# Altium footprint library Connectors.PcbLib: 51 footprints (part 3 of 4)
Each footprint in its own frame and in the unit in brackets; x right, y up, seen from the top. Pads: shape width x height; smd on the part's side, far side on the other; paste and mask are expansions set on the pad; w line width, h text height; cw(c..) or ccw(c..) is an arc to the next point about the centre after c.
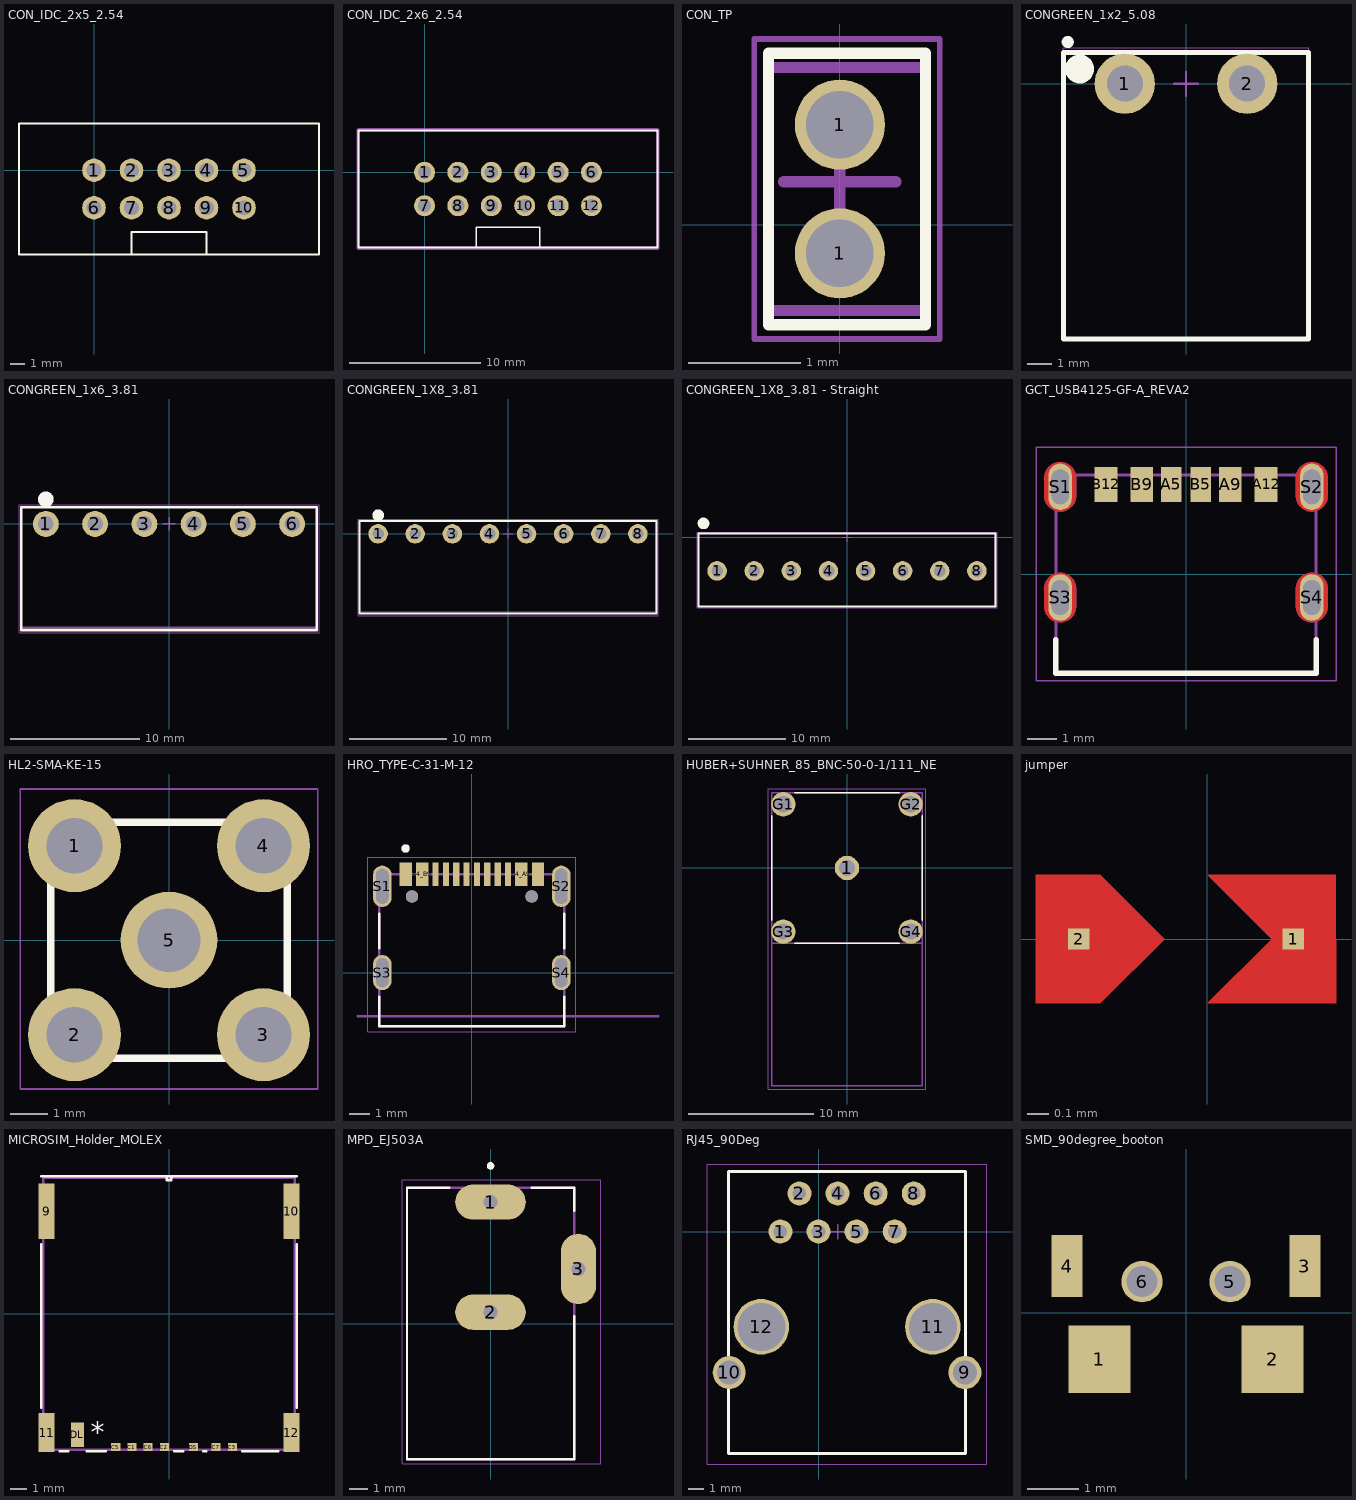
[diagram p2: the footprints below, top view; thin cyan lines are the x and y axes]

## CON_IDC_2x5_2.54 [mm]
pads (10):
  round 1.6 hole 1: 1(0,0) 2(2.54,0) 3(5.08,0) 4(7.62,0) 5(10.16,0) 6(0,-2.54) 7(2.54,-2.54) 8(5.08,-2.54) 9(7.62,-2.54) 10(10.16,-2.54)
Top Overlay:
  lines w0.127: -5.08,-5.715 -5.08,3.175 15.24,3.175 15.24,-5.715 -5.08,-5.715
  lines w0.128: 2.54,-5.715 2.54,-4.191 7.62,-4.191 7.62,-5.715
3D body: height 0.9, standoff 0.1, extent -5.08,-5.715 15.265,3.175

## CON_IDC_2x6_2.54 [mm]
pads (12):
  round 1.6 hole 1: 1(0,0) 2(2.54,0) 3(5.08,0) 4(7.62,0) 5(10.16,0) 6(12.7,0) 7(0,-2.54) 8(2.54,-2.54) 9(5.08,-2.54) 10(7.62,-2.54) 11(10.16,-2.54) 12(12.7,-2.54)
Top Overlay:
  lines w0.128: 3.937,-5.715 3.937,-4.191 8.763,-4.191 8.763,-5.715 ; -5.016,-5.715 17.717,-5.715 17.717,3.175 -5.016,3.175 -5.016,-5.715
Top Assembly:
  lines w0.254: -5.06,-5.77 17.76,-5.77 17.76,3.23 -5.06,3.23 -5.06,-5.77
3D body: height 0.9, standoff 0.1, extent -5.017,-5.715 17.717,3.175

## CON_TP [mm] "Test Point"
height 1.4
pads (2):
  round 0.8 hole 0.6: 1(0,-0.254) 1(0,0.889)
Top Overlay:
  lines w0.1: -0.635,-0.889 0.762,-0.889 0.762,1.524 -0.635,1.524 -0.635,-0.889
Mechanical 1:
  lines w0.1: -0.635,-0.762 -0.635,1.397 ; 0.762,-0.762 0.762,1.397
Mechanical 13:
  lines w0.1: -0.635,-0.762 0.762,-0.762 ; -0.635,1.397 0.762,1.397
Mechanical 15:
  lines w0.05: -0.762,-1.016 -0.762,1.651 0.889,1.651 0.889,-1.016 -0.762,-1.016
  lines w0.1: -0.5,0.381 0.5,0.381 ; 0,-0.119 0,0.881
3D body: height 6.3, standoff 0.1, extent -0.635,-0.762 0.762,1.397

## CONGREEN_1x2_5.08 [mm]
height 4.8
pads (2):
  round 2.5 hole 1.5: 1(-2.54,0) 2(2.54,0)
Top Overlay:
  circle w0.25: c-4.91,1.73 r0.125
  circle w0.6: c-4.42,0.61 r0.3
  lines w0.2: -5.08,-10.6 -5.08,1.3 5.08,1.3 5.08,-10.6 -5.08,-10.6
Mechanical 13:
  circle w0.1: c-4.43,0.61 r0.5
  lines w0.1: -5.08,-10.6 -5.08,1.3 5.08,1.3 5.08,-10.6 -5.08,-10.6
Mechanical 15:
  lines w0.05: -5.1,-10.6 -5.1,1.5 5.1,1.5 5.1,-10.6 -5.1,-10.6
  lines w0.1: -0.5,0 0.5,0 ; 0,-0.5 0,0.5
3D body: height 3.6, standoff -3.6, extent -3.04,-0.5 -2.04,0.5
3D body: height 3.6, standoff -3.6, extent 2.04,-0.5 3.04,0.5
3D body: height 4.6, standoff 3.6, extent 2.02,-9.5 3.02,0.55
3D body: height 4.6, standoff 3.6, extent -3.03,-9.5 -2.03,0.6
3D body: height 8.2, standoff 0.1, extent -5.08,-3.35 5.08,1.35
3D body: height 1.8, standoff 0.1, extent -5.08,-10.62 5.08,1.29
3D body: height 9, standoff 8.2, extent -5.09,-10.622 5.07,-7.9
3D body: height 8.2, standoff 6.5, extent -5.08,-10.62 5.08,1.29

## CONGREEN_1x6_3.81 [mm] "SOIC, 100-Leads, Body 64,17x3,05mm, Pitch 1,27mm, IPC Medium Density"
height 4.8
pads (6):
  round 2 hole 1.2: 1(-9.525,0) 2(-5.715,0) 3(-1.905,0) 4(1.905,0) 5(5.715,0) 6(9.525,0)
Top Overlay:
  circle w0.6: c-9.525,1.905 r0.3
  lines w0.2: -11.43,-8.2 -11.43,1.3 11.43,1.3 11.43,-8.2 -11.43,-8.2
Mechanical 13:
  lines w0.1: -11.43,-8 -11.43,1.3 11.43,1.3 11.43,-8 -11.43,-8
Mechanical 15:
  lines w0.05: -11.6,-8.4 -11.6,1.5 11.6,1.5 11.6,-8.4 -11.6,-8.4
  lines w0.1: -0.5,0 0.5,0 ; 0,-0.5 0,0.5
3D body: height 3.8, standoff 3, extent 9.08,-7.6 9.98,0.4
3D body: height 3.6, standoff -3.6, extent 9.075,-0.45 9.975,0.45
3D body: height 3.8, standoff 3, extent -9.97,-7.6 -9.07,0.4
3D body: height 3.6, standoff -3.6, extent -9.975,-0.45 -9.075,0.45
3D body: height 3.8, standoff 3, extent -6.16,-7.6 -5.26,0.4
3D body: height 3.6, standoff -3.6, extent -6.165,-0.45 -5.265,0.45
3D body: height 3.8, standoff 3, extent -2.35,-7.6 -1.45,0.4
3D body: height 3.6, standoff -3.6, extent -2.355,-0.45 -1.455,0.45
3D body: height 3.6, standoff -3.6, extent 1.455,-0.45 2.355,0.45
3D body: height 3.8, standoff 3, extent 1.46,-7.6 2.36,0.4
3D body: height 6.8, standoff 0.1, extent -11.43,-1.5 11.43,1.35
3D body: height 0.9, standoff 0.1, extent -11.43,-8 11.43,1.29
3D body: height 6.8, standoff 6, extent -11.43,-8 11.43,1.29
3D body: height 3.8, standoff 3, extent 5.27,-7.6 6.17,0.4
3D body: height 3.6, standoff -3.6, extent 5.265,-0.45 6.165,0.45

## CONGREEN_1X8_3.81 [mm] "SOIC, 100-Leads, Body 64,17x3,05mm, Pitch 1,27mm, IPC Medium Density"
height 4.8
pads (8):
  round 2 hole 1.2: 1(-13.335,0) 2(-9.525,0) 3(-5.715,0) 4(-1.905,0) 5(1.905,0) 6(5.715,0) 7(9.525,0) 8(13.335,0)
Top Overlay:
  circle w0.6: c-13.335,1.905 r0.3
  lines w0.2: -15.24,-8.2 -15.24,1.3 15.24,1.3 15.24,-8.2 -15.24,-8.2
Mechanical 13:
  lines w0.1: -15.24,-8 -15.24,1.3 15.24,1.3 15.24,-8 -15.24,-8
Mechanical 15:
  lines w0.05: -15.4,-8.4 -15.4,1.5 15.4,1.5 15.4,-8.4 -15.4,-8.4
  lines w0.1: -0.5,0 0.5,0 ; 0,-0.5 0,0.5
3D body: height 3.8, standoff 3, extent 12.89,-7.6 13.79,0.4
3D body: height 3.6, standoff -3.6, extent 12.885,-0.45 13.785,0.45
3D body: height 3.8, standoff 3, extent 9.08,-7.6 9.98,0.4
3D body: height 3.6, standoff -3.6, extent 9.075,-0.45 9.975,0.45
3D body: height 3.8, standoff 3, extent 5.27,-7.6 6.17,0.4
3D body: height 3.6, standoff -3.6, extent 5.265,-0.45 6.165,0.45
3D body: height 3.8, standoff 3, extent -13.78,-7.6 -12.88,0.4
3D body: height 3.6, standoff -3.6, extent -13.785,-0.45 -12.885,0.45
3D body: height 3.8, standoff 3, extent -9.97,-7.6 -9.07,0.4
3D body: height 3.6, standoff -3.6, extent -9.975,-0.45 -9.075,0.45
3D body: height 3.8, standoff 3, extent -6.16,-7.6 -5.26,0.4
3D body: height 3.6, standoff -3.6, extent -6.165,-0.45 -5.265,0.45
3D body: height 3.6, standoff -3.6, extent -2.355,-0.45 -1.455,0.45
3D body: height 3.8, standoff 3, extent -2.35,-7.6 -1.45,0.4
3D body: height 6.8, standoff 0.1, extent -15.24,-1.5 15.24,1.35
3D body: height 0.9, standoff 0.1, extent -15.24,-8 15.24,1.29
3D body: height 6.8, standoff 6, extent -15.24,-8 15.24,1.29
3D body: height 3.8, standoff 3, extent 1.46,-7.6 2.36,0.4
3D body: height 3.6, standoff -3.6, extent 1.455,-0.45 2.355,0.45

## CONGREEN_1X8_3.81 - Straight [mm] "Straight Pin 3.81MM Pitch green connector"
height 4.8
pads (8):
  round 2 hole 1.2: 1(-13.335,-3.48) 2(-9.525,-3.48) 3(-5.715,-3.48) 4(-1.905,-3.48) 5(1.905,-3.48) 6(5.715,-3.48) 7(9.525,-3.48) 8(13.335,-3.48)
Top Overlay:
  circle w0.6: c-14.732,1.397 r0.3
  lines w0.2: -15.24,-7.112 -15.24,0.381 15.24,0.381 15.24,-7.112 -15.24,-7.112
Mechanical 13:
  lines w0.1: -15.24,-7.112 -15.24,0.381 15.24,0.381 15.24,-7.112 -15.24,-7.112
Mechanical 15:
  lines w0.05: -15.4,-7.239 -15.4,0.508 15.4,0.508 15.4,-7.239 -15.4,-7.239
  lines w0.1: -0.5,0 0.5,0 ; 0,-0.5 0,0.5
3D body: height 6, standoff -1.2, extent -9.975,-3.93 -9.075,-3.03
3D body: height 6, standoff -1.2, extent 12.885,-3.93 13.785,-3.03
3D body: height 6, standoff -1.2, extent 9.075,-3.93 9.975,-3.03
3D body: height 6, standoff -1.2, extent 5.265,-3.93 6.165,-3.03
3D body: height 6, standoff -1.2, extent -13.785,-3.93 -12.885,-3.03
3D body: height 6, standoff -1.2, extent -6.165,-3.93 -5.265,-3.03
3D body: height 6, standoff -1.2, extent -2.355,-3.93 -1.455,-3.03
3D body: height 0.9, standoff 0.1, extent -15.24,-7.112 15.24,0.381
3D body: height 6, standoff -1.2, extent 1.455,-3.93 2.355,-3.03
3D body: height 8, standoff 0.1, extent -15.24,-0.381 15.24,0.381
3D body: height 8, standoff 0.1, extent -15.24,-7.112 15.24,-6.35

## GCT_USB4125-GF-A_REVA2 [mm]
pads (10):
  rect 0.7x1.2 smd: A5(-0.5,3.08) B5(0.5,3.08)
  rect 0.76x1.2 smd: A9(1.52,3.08) B9(-1.52,3.08)
  rect 0.8x1.2 smd: A12(2.75,3.08) B12(-2.75,3.08)
  oval 0.8x1.6 hole 0.6 slot 1.2 at 90 deg mask+0: S1(-4.32,3) S2(4.32,3) S3(-4.32,-0.8) S4(4.32,-0.8)
Top Layer:
  region: -4.291,0.049 -4.263,0.047 -4.234,0.043 -4.206,0.038 -4.178,0.031 -4.15,0.023 -4.123,0.013 -4.096,0.002 -4.07,-0.01 -4.045,-0.024 -4.02,-0.039 -3.997,-0.055 -3.974,-0.073 -3.952,-0.091 -3.931,-0.111 -3.911,-0.132 -3.893,-0.154 -3.875,-0.177 -3.859,-0.2 -3.844,-0.225 -3.83,-0.25 -3.818,-0.276 -3.807,-0.303 -3.797,-0.33 -3.789,-0.358 -3.782,-0.386 -3.777,-0.414 -3.773,-0.443 -3.771,-0.471 -3.77,-0.5 -3.77,-1.1 -3.771,-1.129 -3.773,-1.157 -3.777,-1.186 -3.782,-1.214 -3.789,-1.242 -3.797,-1.27 -3.807,-1.297 -3.818,-1.324 -3.83,-1.35 -3.844,-1.375 -3.859,-1.4 -3.875,-1.423 -3.893,-1.446 -3.911,-1.468 -3.931,-1.489 -3.952,-1.509 -3.974,-1.527 -3.997,-1.545 -4.02,-1.561 -4.045,-1.576 -4.07,-1.59 -4.096,-1.602 -4.123,-1.613 -4.15,-1.623 -4.178,-1.631 -4.206,-1.638 -4.234,-1.643 -4.263,-1.647 -4.291,-1.649 -4.32,-1.65 -4.349,-1.649 -4.377,-1.647 -4.406,-1.643 -4.434,-1.638 -4.462,-1.631 -4.49,-1.623 -4.517,-1.613 -4.544,-1.602 -4.57,-1.59 -4.595,-1.576 -4.62,-1.561 -4.643,-1.545 -4.666,-1.527 -4.688,-1.509 -4.709,-1.489 -4.729,-1.468 -4.747,-1.446 -4.765,-1.423 -4.781,-1.4 -4.796,-1.375 -4.81,-1.35 -4.822,-1.324 -4.833,-1.297 -4.843,-1.27 -4.851,-1.242 -4.858,-1.214 -4.863,-1.186 -4.867,-1.157 -4.869,-1.129 -4.87,-1.1 -4.87,-0.5 -4.869,-0.471 -4.867,-0.443 -4.863,-0.414 -4.858,-0.386 -4.851,-0.358 -4.843,-0.33 -4.833,-0.303 -4.822,-0.276 -4.81,-0.25 -4.796,-0.225 -4.781,-0.2 -4.765,-0.177 -4.747,-0.154 -4.729,-0.132 -4.709,-0.111 -4.688,-0.091 -4.666,-0.073 -4.643,-0.055 -4.62,-0.039 -4.595,-0.024 -4.57,-0.01 -4.544,0.002 -4.517,0.013 -4.49,0.023 -4.462,0.031 -4.434,0.038 -4.406,0.043 -4.377,0.047 -4.349,0.049 -4.32,0.05
  region: 4.349,0.049 4.377,0.047 4.406,0.043 4.434,0.038 4.462,0.031 4.49,0.023 4.517,0.013 4.544,0.002 4.57,-0.01 4.595,-0.024 4.62,-0.039 4.643,-0.055 4.666,-0.073 4.688,-0.091 4.709,-0.111 4.729,-0.132 4.747,-0.154 4.765,-0.177 4.781,-0.2 4.796,-0.225 4.81,-0.25 4.822,-0.276 4.833,-0.303 4.843,-0.33 4.851,-0.358 4.858,-0.386 4.863,-0.414 4.867,-0.443 4.869,-0.471 4.87,-0.5 4.87,-1.1 4.869,-1.129 4.867,-1.157 4.863,-1.186 4.858,-1.214 4.851,-1.242 4.843,-1.27 4.833,-1.297 4.822,-1.324 4.81,-1.35 4.796,-1.375 4.781,-1.4 4.765,-1.423 4.747,-1.446 4.729,-1.468 4.709,-1.489 4.688,-1.509 4.666,-1.527 4.643,-1.545 4.62,-1.561 4.595,-1.576 4.57,-1.59 4.544,-1.602 4.517,-1.613 4.49,-1.623 4.462,-1.631 4.434,-1.638 4.406,-1.643 4.377,-1.647 4.349,-1.649 4.32,-1.65 4.291,-1.649 4.263,-1.647 4.234,-1.643 4.206,-1.638 4.178,-1.631 4.15,-1.623 4.123,-1.613 4.096,-1.602 4.07,-1.59 4.045,-1.576 4.02,-1.561 3.997,-1.545 3.974,-1.527 3.952,-1.509 3.931,-1.489 3.911,-1.468 3.893,-1.446 3.875,-1.423 3.859,-1.4 3.844,-1.375 3.83,-1.35 3.818,-1.324 3.807,-1.297 3.797,-1.27 3.789,-1.242 3.782,-1.214 3.777,-1.186 3.773,-1.157 3.771,-1.129 3.77,-1.1 3.77,-0.5 3.771,-0.471 3.773,-0.443 3.777,-0.414 3.782,-0.386 3.789,-0.358 3.797,-0.33 3.807,-0.303 3.818,-0.276 3.83,-0.25 3.844,-0.225 3.859,-0.2 3.875,-0.177 3.893,-0.154 3.911,-0.132 3.931,-0.111 3.952,-0.091 3.974,-0.073 3.997,-0.055 4.02,-0.039 4.045,-0.024 4.07,-0.01 4.096,0.002 4.123,0.013 4.15,0.023 4.178,0.031 4.206,0.038 4.234,0.043 4.263,0.047 4.291,0.049 4.32,0.05
  region: -4.291,3.849 -4.263,3.847 -4.234,3.843 -4.206,3.838 -4.178,3.831 -4.15,3.823 -4.123,3.813 -4.096,3.802 -4.07,3.79 -4.045,3.776 -4.02,3.761 -3.997,3.745 -3.974,3.727 -3.952,3.709 -3.931,3.689 -3.911,3.668 -3.893,3.646 -3.875,3.623 -3.859,3.6 -3.844,3.575 -3.83,3.55 -3.818,3.524 -3.807,3.497 -3.797,3.47 -3.789,3.442 -3.782,3.414 -3.777,3.386 -3.773,3.357 -3.771,3.329 -3.77,3.3 -3.77,2.7 -3.771,2.671 -3.773,2.643 -3.777,2.614 -3.782,2.586 -3.789,2.558 -3.797,2.53 -3.807,2.503 -3.818,2.476 -3.83,2.45 -3.844,2.425 -3.859,2.4 -3.875,2.377 -3.893,2.354 -3.911,2.332 -3.931,2.311 -3.952,2.291 -3.974,2.273 -3.997,2.255 -4.02,2.239 -4.045,2.224 -4.07,2.21 -4.096,2.198 -4.123,2.187 -4.15,2.177 -4.178,2.169 -4.206,2.162 -4.234,2.157 -4.263,2.153 -4.291,2.151 -4.32,2.15 -4.349,2.151 -4.377,2.153 -4.406,2.157 -4.434,2.162 -4.462,2.169 -4.49,2.177 -4.517,2.187 -4.544,2.198 -4.57,2.21 -4.595,2.224 -4.62,2.239 -4.643,2.255 -4.666,2.273 -4.688,2.291 -4.709,2.311 -4.729,2.332 -4.747,2.354 -4.765,2.377 -4.781,2.4 -4.796,2.425 -4.81,2.45 -4.822,2.476 -4.833,2.503 -4.843,2.53 -4.851,2.558 -4.858,2.586 -4.863,2.614 -4.867,2.643 -4.869,2.671 -4.87,2.7 -4.87,3.3 -4.869,3.329 -4.867,3.357 -4.863,3.386 -4.858,3.414 -4.851,3.442 -4.843,3.47 -4.833,3.497 -4.822,3.524 -4.81,3.55 -4.796,3.575 -4.781,3.6 -4.765,3.623 -4.747,3.646 -4.729,3.668 -4.709,3.689 -4.688,3.709 -4.666,3.727 -4.643,3.745 -4.62,3.761 -4.595,3.776 -4.57,3.79 -4.544,3.802 -4.517,3.813 -4.49,3.823 -4.462,3.831 -4.434,3.838 -4.406,3.843 -4.377,3.847 -4.349,3.849 -4.32,3.85
  region: 4.349,3.849 4.377,3.847 4.406,3.843 4.434,3.838 4.462,3.831 4.49,3.823 4.517,3.813 4.544,3.802 4.57,3.79 4.595,3.776 4.62,3.761 4.643,3.745 4.666,3.727 4.688,3.709 4.709,3.689 4.729,3.668 4.747,3.646 4.765,3.623 4.781,3.6 4.796,3.575 4.81,3.55 4.822,3.524 4.833,3.497 4.843,3.47 4.851,3.442 4.858,3.414 4.863,3.386 4.867,3.357 4.869,3.329 4.87,3.3 4.87,2.7 4.869,2.671 4.867,2.643 4.863,2.614 4.858,2.586 4.851,2.558 4.843,2.53 4.833,2.503 4.822,2.476 4.81,2.45 4.796,2.425 4.781,2.4 4.765,2.377 4.747,2.354 4.729,2.332 4.709,2.311 4.688,2.291 4.666,2.273 4.643,2.255 4.62,2.239 4.595,2.224 4.57,2.21 4.544,2.198 4.517,2.187 4.49,2.177 4.462,2.169 4.434,2.162 4.406,2.157 4.377,2.153 4.349,2.151 4.32,2.15 4.291,2.151 4.263,2.153 4.234,2.157 4.206,2.162 4.178,2.169 4.15,2.177 4.123,2.187 4.096,2.198 4.07,2.21 4.045,2.224 4.02,2.239 3.997,2.255 3.974,2.273 3.952,2.291 3.931,2.311 3.911,2.332 3.893,2.354 3.875,2.377 3.859,2.4 3.844,2.425 3.83,2.45 3.818,2.476 3.807,2.503 3.797,2.53 3.789,2.558 3.782,2.586 3.777,2.614 3.773,2.643 3.771,2.671 3.77,2.7 3.77,3.3 3.771,3.329 3.773,3.357 3.777,3.386 3.782,3.414 3.789,3.442 3.797,3.47 3.807,3.497 3.818,3.524 3.83,3.55 3.844,3.575 3.859,3.6 3.875,3.623 3.893,3.646 3.911,3.668 3.931,3.689 3.952,3.709 3.974,3.727 3.997,3.745 4.02,3.761 4.045,3.776 4.07,3.79 4.096,3.802 4.123,3.813 4.15,3.823 4.178,3.831 4.206,3.838 4.234,3.843 4.263,3.847 4.291,3.849 4.32,3.85
Bottom Layer:
  region: -4.291,0.049 -4.263,0.047 -4.234,0.043 -4.206,0.038 -4.178,0.031 -4.15,0.023 -4.123,0.013 -4.096,0.002 -4.07,-0.01 -4.045,-0.024 -4.02,-0.039 -3.997,-0.055 -3.974,-0.073 -3.952,-0.091 -3.931,-0.111 -3.911,-0.132 -3.893,-0.154 -3.875,-0.177 -3.859,-0.2 -3.844,-0.225 -3.83,-0.25 -3.818,-0.276 -3.807,-0.303 -3.797,-0.33 -3.789,-0.358 -3.782,-0.386 -3.777,-0.414 -3.773,-0.443 -3.771,-0.471 -3.77,-0.5 -3.77,-1.1 -3.771,-1.129 -3.773,-1.157 -3.777,-1.186 -3.782,-1.214 -3.789,-1.242 -3.797,-1.27 -3.807,-1.297 -3.818,-1.324 -3.83,-1.35 -3.844,-1.375 -3.859,-1.4 -3.875,-1.423 -3.893,-1.446 -3.911,-1.468 -3.931,-1.489 -3.952,-1.509 -3.974,-1.527 -3.997,-1.545 -4.02,-1.561 -4.045,-1.576 -4.07,-1.59 -4.096,-1.602 -4.123,-1.613 -4.15,-1.623 -4.178,-1.631 -4.206,-1.638 -4.234,-1.643 -4.263,-1.647 -4.291,-1.649 -4.32,-1.65 -4.349,-1.649 -4.377,-1.647 -4.406,-1.643 -4.434,-1.638 -4.462,-1.631 -4.49,-1.623 -4.517,-1.613 -4.544,-1.602 -4.57,-1.59 -4.595,-1.576 -4.62,-1.561 -4.643,-1.545 -4.666,-1.527 -4.688,-1.509 -4.709,-1.489 -4.729,-1.468 -4.747,-1.446 -4.765,-1.423 -4.781,-1.4 -4.796,-1.375 -4.81,-1.35 -4.822,-1.324 -4.833,-1.297 -4.843,-1.27 -4.851,-1.242 -4.858,-1.214 -4.863,-1.186 -4.867,-1.157 -4.869,-1.129 -4.87,-1.1 -4.87,-0.5 -4.869,-0.471 -4.867,-0.443 -4.863,-0.414 -4.858,-0.386 -4.851,-0.358 -4.843,-0.33 -4.833,-0.303 -4.822,-0.276 -4.81,-0.25 -4.796,-0.225 -4.781,-0.2 -4.765,-0.177 -4.747,-0.154 -4.729,-0.132 -4.709,-0.111 -4.688,-0.091 -4.666,-0.073 -4.643,-0.055 -4.62,-0.039 -4.595,-0.024 -4.57,-0.01 -4.544,0.002 -4.517,0.013 -4.49,0.023 -4.462,0.031 -4.434,0.038 -4.406,0.043 -4.377,0.047 -4.349,0.049 -4.32,0.05
  region: 4.349,0.049 4.377,0.047 4.406,0.043 4.434,0.038 4.462,0.031 4.49,0.023 4.517,0.013 4.544,0.002 4.57,-0.01 4.595,-0.024 4.62,-0.039 4.643,-0.055 4.666,-0.073 4.688,-0.091 4.709,-0.111 4.729,-0.132 4.747,-0.154 4.765,-0.177 4.781,-0.2 4.796,-0.225 4.81,-0.25 4.822,-0.276 4.833,-0.303 4.843,-0.33 4.851,-0.358 4.858,-0.386 4.863,-0.414 4.867,-0.443 4.869,-0.471 4.87,-0.5 4.87,-1.1 4.869,-1.129 4.867,-1.157 4.863,-1.186 4.858,-1.214 4.851,-1.242 4.843,-1.27 4.833,-1.297 4.822,-1.324 4.81,-1.35 4.796,-1.375 4.781,-1.4 4.765,-1.423 4.747,-1.446 4.729,-1.468 4.709,-1.489 4.688,-1.509 4.666,-1.527 4.643,-1.545 4.62,-1.561 4.595,-1.576 4.57,-1.59 4.544,-1.602 4.517,-1.613 4.49,-1.623 4.462,-1.631 4.434,-1.638 4.406,-1.643 4.377,-1.647 4.349,-1.649 4.32,-1.65 4.291,-1.649 4.263,-1.647 4.234,-1.643 4.206,-1.638 4.178,-1.631 4.15,-1.623 4.123,-1.613 4.096,-1.602 4.07,-1.59 4.045,-1.576 4.02,-1.561 3.997,-1.545 3.974,-1.527 3.952,-1.509 3.931,-1.489 3.911,-1.468 3.893,-1.446 3.875,-1.423 3.859,-1.4 3.844,-1.375 3.83,-1.35 3.818,-1.324 3.807,-1.297 3.797,-1.27 3.789,-1.242 3.782,-1.214 3.777,-1.186 3.773,-1.157 3.771,-1.129 3.77,-1.1 3.77,-0.5 3.771,-0.471 3.773,-0.443 3.777,-0.414 3.782,-0.386 3.789,-0.358 3.797,-0.33 3.807,-0.303 3.818,-0.276 3.83,-0.25 3.844,-0.225 3.859,-0.2 3.875,-0.177 3.893,-0.154 3.911,-0.132 3.931,-0.111 3.952,-0.091 3.974,-0.073 3.997,-0.055 4.02,-0.039 4.045,-0.024 4.07,-0.01 4.096,0.002 4.123,0.013 4.15,0.023 4.178,0.031 4.206,0.038 4.234,0.043 4.263,0.047 4.291,0.049 4.32,0.05
  region: -4.291,3.849 -4.263,3.847 -4.234,3.843 -4.206,3.838 -4.178,3.831 -4.15,3.823 -4.123,3.813 -4.096,3.802 -4.07,3.79 -4.045,3.776 -4.02,3.761 -3.997,3.745 -3.974,3.727 -3.952,3.709 -3.931,3.689 -3.911,3.668 -3.893,3.646 -3.875,3.623 -3.859,3.6 -3.844,3.575 -3.83,3.55 -3.818,3.524 -3.807,3.497 -3.797,3.47 -3.789,3.442 -3.782,3.414 -3.777,3.386 -3.773,3.357 -3.771,3.329 -3.77,3.3 -3.77,2.7 -3.771,2.671 -3.773,2.643 -3.777,2.614 -3.782,2.586 -3.789,2.558 -3.797,2.53 -3.807,2.503 -3.818,2.476 -3.83,2.45 -3.844,2.425 -3.859,2.4 -3.875,2.377 -3.893,2.354 -3.911,2.332 -3.931,2.311 -3.952,2.291 -3.974,2.273 -3.997,2.255 -4.02,2.239 -4.045,2.224 -4.07,2.21 -4.096,2.198 -4.123,2.187 -4.15,2.177 -4.178,2.169 -4.206,2.162 -4.234,2.157 -4.263,2.153 -4.291,2.151 -4.32,2.15 -4.349,2.151 -4.377,2.153 -4.406,2.157 -4.434,2.162 -4.462,2.169 -4.49,2.177 -4.517,2.187 -4.544,2.198 -4.57,2.21 -4.595,2.224 -4.62,2.239 -4.643,2.255 -4.666,2.273 -4.688,2.291 -4.709,2.311 -4.729,2.332 -4.747,2.354 -4.765,2.377 -4.781,2.4 -4.796,2.425 -4.81,2.45 -4.822,2.476 -4.833,2.503 -4.843,2.53 -4.851,2.558 -4.858,2.586 -4.863,2.614 -4.867,2.643 -4.869,2.671 -4.87,2.7 -4.87,3.3 -4.869,3.329 -4.867,3.357 -4.863,3.386 -4.858,3.414 -4.851,3.442 -4.843,3.47 -4.833,3.497 -4.822,3.524 -4.81,3.55 -4.796,3.575 -4.781,3.6 -4.765,3.623 -4.747,3.646 -4.729,3.668 -4.709,3.689 -4.688,3.709 -4.666,3.727 -4.643,3.745 -4.62,3.761 -4.595,3.776 -4.57,3.79 -4.544,3.802 -4.517,3.813 -4.49,3.823 -4.462,3.831 -4.434,3.838 -4.406,3.843 -4.377,3.847 -4.349,3.849 -4.32,3.85
  region: 4.349,3.849 4.377,3.847 4.406,3.843 4.434,3.838 4.462,3.831 4.49,3.823 4.517,3.813 4.544,3.802 4.57,3.79 4.595,3.776 4.62,3.761 4.643,3.745 4.666,3.727 4.688,3.709 4.709,3.689 4.729,3.668 4.747,3.646 4.765,3.623 4.781,3.6 4.796,3.575 4.81,3.55 4.822,3.524 4.833,3.497 4.843,3.47 4.851,3.442 4.858,3.414 4.863,3.386 4.867,3.357 4.869,3.329 4.87,3.3 4.87,2.7 4.869,2.671 4.867,2.643 4.863,2.614 4.858,2.586 4.851,2.558 4.843,2.53 4.833,2.503 4.822,2.476 4.81,2.45 4.796,2.425 4.781,2.4 4.765,2.377 4.747,2.354 4.729,2.332 4.709,2.311 4.688,2.291 4.666,2.273 4.643,2.255 4.62,2.239 4.595,2.224 4.57,2.21 4.544,2.198 4.517,2.187 4.49,2.177 4.462,2.169 4.434,2.162 4.406,2.157 4.377,2.153 4.349,2.151 4.32,2.15 4.291,2.151 4.263,2.153 4.234,2.157 4.206,2.162 4.178,2.169 4.15,2.177 4.123,2.187 4.096,2.198 4.07,2.21 4.045,2.224 4.02,2.239 3.997,2.255 3.974,2.273 3.952,2.291 3.931,2.311 3.911,2.332 3.893,2.354 3.875,2.377 3.859,2.4 3.844,2.425 3.83,2.45 3.818,2.476 3.807,2.503 3.797,2.53 3.789,2.558 3.782,2.586 3.777,2.614 3.773,2.643 3.771,2.671 3.77,2.7 3.77,3.3 3.771,3.329 3.773,3.357 3.777,3.386 3.782,3.414 3.789,3.442 3.797,3.47 3.807,3.497 3.818,3.524 3.83,3.55 3.844,3.575 3.859,3.6 3.875,3.623 3.893,3.646 3.911,3.668 3.931,3.689 3.952,3.709 3.974,3.727 3.997,3.745 4.02,3.761 4.045,3.776 4.07,3.79 4.096,3.802 4.123,3.813 4.15,3.823 4.178,3.831 4.206,3.838 4.234,3.843 4.263,3.847 4.291,3.849 4.32,3.85
Top Overlay:
  lines w0.2: -4.47,-2.25 -4.47,-3.4 4.47,-3.4 4.47,-2.25
Top Solder:
  drawing of 4 lines, arcs and shapes, not listed
Bottom Solder:
  drawing of 4 lines, arcs and shapes, not listed
Mechanical 13:
  lines w0.1: -4.47,-3.4 4.47,-3.4 4.47,3.4 -4.47,3.4 -4.47,-3.4
Mechanical 15:
  lines w0.05: -5.15,-3.65 5.15,-3.65 5.15,4.35 -5.15,4.35 -5.15,-3.65
3D body "usb4125-gf-a.stp": height 3.27, standoff -0.99, extent -4.597,-3.175 4.343,3.725

## HL2-SMA-KE-15 [mm] "Through Hole Coaxial Connector (RF) Adapters RoHS"
height 4.8
pads (5):
  round 2.5 hole 1.5: 1(-2.54,2.54) 2(-2.54,-2.54) 3(2.54,-2.54) 4(2.54,2.54)
  round 2.6 hole 1.7: 5(0,0)
Top Overlay:
  lines w0.2: -3.175,-3.175 3.175,-3.175 3.175,3.175 -3.175,3.175 -3.175,-3.175
Mechanical 13:
  lines w0.1: -3.175,-3.175 -3.175,3.175 3.175,3.175 3.175,-3.175 -3.175,-3.175
Mechanical 15:
  lines w0.05: -4,-4 4,-4 4,4.064 -4,4.064 -4,-4
  lines w0.1: -0.5,0 0.5,0 ; 0,-0.5 0,0.5
3D body: height 11, standoff 0.1, extent -3.175,-3.175 3.175,3.175

## HRO_TYPE-C-31-M-12 [mm]
height 3.26
pads (18):
  rect 0.6x1.14 smd mask+0.05: A1_B12(-3.2,4.75) A4_B9(-2.4,4.75) B1_A12(3.2,4.75) B4_A9(2.4,4.75)
  rect 0.3x1.14 smd mask+0.05: A5(-1.25,4.75) A6(-0.25,4.75) A7(0.25,4.75) A8(1.25,4.75) B5(1.75,4.75) B6(0.75,4.75) B7(-0.75,4.75) B8(-1.75,4.75)
  oval 0.9x2 hole 0.6 slot 1.7 at 90 deg: S1(-4.325,4.17) S2(4.325,4.17)
  oval 0.9x1.7 hole 0.6 slot 1.4 at 90 deg: S3(-4.325,0) S4(4.325,0)
  round 0.6 hole 0.6 unplated: ""(-2.89,3.68) ""(2.89,3.68)
Top Overlay:
  circle w0.2: c-3.2,6 r0.1
  lines w0.127: -4.47,-1.17 -4.47,-2.6 4.47,-2.6 4.47,-1.17 ; -4.47,1.17 -4.47,2.85 ; 4.47,1.17 4.47,2.85
Mechanical 13:
  circle w0.2: c-3.2,6 r0.1
  lines w0.127: -5.5,-2.11 9,-2.11 ; -4.47,-2.6 -4.47,4.75 4.47,4.75 4.47,-2.6 -4.47,-2.6
  text "PCB EDGE" at 5.2,-1.9 h0.61
Mechanical 15:
  lines w0.05: -5.025,-2.85 5.025,-2.85 5.025,5.57 -5.025,5.57 -5.025,-2.85
3D body "step_temp.STEP": height 3.31, standoff -0.99, extent -4.47,-2.6 4.47,5.305

## HUBER+SUHNER_85_BNC-50-0-1/111_NE [mm]
height 20.5
pads (5):
  round 1.95 hole 1.3: 1(0,0) G1(-5.08,5.08) G2(5.08,5.08) G3(-5.08,-5.08) G4(5.08,-5.08)
Top Overlay:
  lines w0.127: -6,-4.169 -6,4.169 ; -4.169,-6 4.169,-6 ; -4.169,6 4.169,6 ; 6,-4.169 6,4.169
Mechanical 13:
  lines w0.127: -6,-6 6,-6 ; -6,-6 -6,-17.4 6,-17.4 6,-6 ; -6,-6 -6,6 6,6 6,-6
Mechanical 15:
  lines w0.05: -6.305,-17.65 -6.305,6.305 6.305,6.305 6.305,-17.65 -6.305,-17.65
3D body "step_temp.STEP": height 5.51, standoff -19, extent -6,-6 17.41,6

## jumper [mm]
pads (2):
  rect 0.1x0.1 smd: 1(0.4,0) 2(-0.6,0)
Top Layer:
  region: 0,0.3 0.3,0 0,-0.3 0.6,-0.3 0.6,0.3
  region: -0.5,-0.3 -0.2,0 -0.5,0.3 -0.8,0.3 -0.8,-0.3

## MICROSIM_Holder_MOLEX [mil]
pads (12):
  rect 39x134 smd: 9(-297.24,248.79) 10(297.24,248.79)
  rect 39x94 smd: 11(-297.24,-288.61) 12(297.24,-288.61)
  rect 22x20 smd: C1(-89.96,-324.04) C2(-11.22,-324.04) C3(153.74,-324.04) C5(-129.33,-324.04) C6(-50.59,-324.04) C7(114.37,-324.04) DS(59.06,-324.04)
  rect 32x59 smd: DL(-222.44,-293.73)
Top Overlay:
  lines w6: -310,-229 -310,169 ; -310,334 -5,334 ; -265,-334 -245,-334 ; -200,-334 -153,-334 ; 13,-334 35,-334 ; 83,-334 90,-334 ; 178,-334 265,-334 ; 310,-229 310,169 ; 310,334 5,334 ; -5,334 -5,324 5,324 5,334 ; -5,334 5,334
  text "*" at -190,-312.5 h50
Mechanical 13:
  lines w6: -305,-330 -305,330 305,330 305,-330 -305,-330
  text "*" at -190,-312.5 h50

## MPD_EJ503A [mm]
height 11
pads (3):
  oval 3.8x1.9 hole 0.76 square: 1(0,6.54) 2(0,0.61)
  oval 1.9x3.8 hole 0.76 square: 3(4.73,2.94)
Top Overlay:
  circle w0.2: c0,8.49 r0.1
  lines w0.127: -2.22,7.31 -4.5,7.31 -4.5,-7.31 4.5,-7.31 4.5,0.4 ; 2.22,7.31 4.5,7.31 4.5,6.08
Mechanical 13:
  circle w0.2: c0,8.49 r0.1
  lines w0.127: -4.5,-7.31 -4.5,7.31 4.5,7.31 4.5,-7.31 -4.5,-7.31
Mechanical 15:
  lines w0.05: -4.75,-7.56 -4.75,7.74 5.93,7.74 5.93,-7.56 -4.75,-7.56
3D body "step_temp.STEP": height 11, standoff -4.3, extent -4.5,-7.31 4.88,7.31

## RJ45_90Deg [mm]
pads (12):
  round 1.6 hole 0.9: 1(-2.54,0) 2(-1.27,2.54) 3(0,0) 4(1.27,2.54) 5(2.54,0) 6(3.81,2.54) 7(5.08,0) 8(6.35,2.54)
  round 2.2 hole 1.6: 9(9.76,-9.4) 10(-5.95,-9.4)
  round 3.7 hole 3.2: 11(7.62,-6.35) 12(-3.81,-6.35)
Top Overlay:
  lines w0.2: -6,-14.8 -6,4 9.8,4 9.8,-14.8 -6,-14.8
Mechanical 13:
  lines w0.1: -6,-14.8 -6,4 9.8,4 9.8,-14.8 -6,-14.8
Mechanical 15:
  lines w0.05: -7.4,-15.5 -7.4,4.5 11.2,4.5 11.2,-15.5 -7.4,-15.5
  lines w0.1: 0.77,0 1.77,0 ; 1.27,-0.5 1.27,0.5
3D body: height 13.3, standoff 0.3, extent -6,-14.8 9.8,4

## SMD_90degree_booton [mm]
pads (6):
  rect 1.2x1.3 smd: 1(-1.675,-0.9) 2(1.675,-0.9)
  rect 0.6x1.2 smd: 3(2.3,0.9) 4(-2.3,0.9)
  round 0.8 hole 0.6: 5(0.85,0.6) 6(-0.85,0.6)
3D body: height 1.8, standoff 0, extent -2.4,-1.3 2.4,1.6
3D body: height 1.35, standoff 0.45, extent -1.15,1.5 1.15,2.6